# Altium integrated library ESP32-MINI-1-N4.IntLib: 1 symbol
Pins are listed as number, name and electrical type; pins without a type are passive.

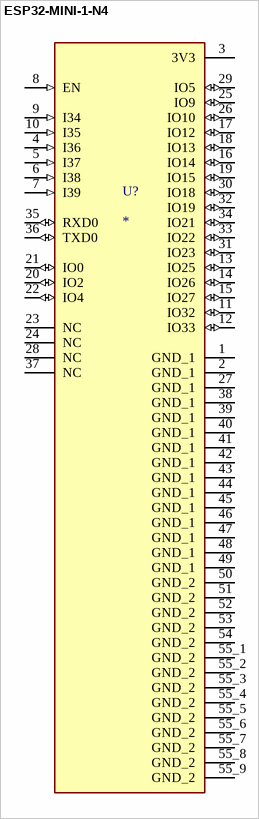
[diagram p0: symbol ESP32-MINI-1-N4]

## ESP32-MINI-1-N4
designator U?
Bluetooth, WiFi 802.11b/g/n, Bluetooth v4.2 +EDR, Class 1, 2 and 3 Transceiver Module 2.412GHz ~ 2.484GHz Integrated, Trace Chassis Mount; MF: Espressif Systems; MP: ESP32-MINI-1-N4; SnapEDA_Link: https://www.snapeda.com/parts/ESP32-MINI-1-N4/Espressif+Systems/view-part/?ref=snap; Package: Module Espressif Systems; Value: *; Check_prices: https://www.snapeda.com/parts/ESP32-MINI-1-N4/Espressif+Systems/view-part/?ref=eda
footprint XCVR_ESP32-MINI-1-N4
pins: 1 GND_1 (power), 2 GND_1 (power), 3 3V3 (power), 4 I36 (in), 5 I37 (in), 6 I38 (in), 7 I39 (in), 8 EN (in), 9 I34 (in), 10 I35 (in), 11 IO32 (io), 12 IO33 (io), 13 IO25 (io), 14 IO26 (io), 15 IO27 (io), 16 IO14 (io), 17 IO12 (io), 18 IO13 (io), 19 IO15 (io), 20 IO2 (io), 21 IO0 (io), 22 IO4 (io), 23 NC, 24 NC, 25 IO9 (io), 26 IO10 (io), 27 GND_1 (power), 28 NC, 29 IO5 (io), 30 IO18 (io), 31 IO23 (io), 32 IO19 (io), 33 IO22 (io), 34 IO21 (io), 35 RXD0 (io), 36 TXD0 (io), 37 NC, 38 GND_1 (power), 39 GND_1 (power), 40 GND_1 (power), 41 GND_1 (power), 42 GND_1 (power), 43 GND_1 (power), 44 GND_1 (power), 45 GND_1 (power), 46 GND_1 (power), 47 GND_1 (power), 48 GND_1 (power), 49 GND_1 (power), 50 GND_2 (power), 51 GND_2 (power), 52 GND_2 (power), 53 GND_2 (power), 54 GND_2 (power), 55_1 GND_2 (power), 55_2 GND_2 (power), 55_3 GND_2 (power), 55_4 GND_2 (power), 55_5 GND_2 (power), 55_6 GND_2 (power), 55_7 GND_2 (power), 55_8 GND_2 (power), 55_9 GND_2 (power)